# Altium footprint library Connectors.PcbLib: 228 footprints (part 14 of 15)
Each footprint in its own frame and in the unit in brackets; x right, y up, seen from the top. Pads: shape width x height; smd on the part's side, far side on the other; paste and mask are expansions set on the pad; w line width, h text height; cw(c..) or ccw(c..) is an arc to the next point about the centre after c.
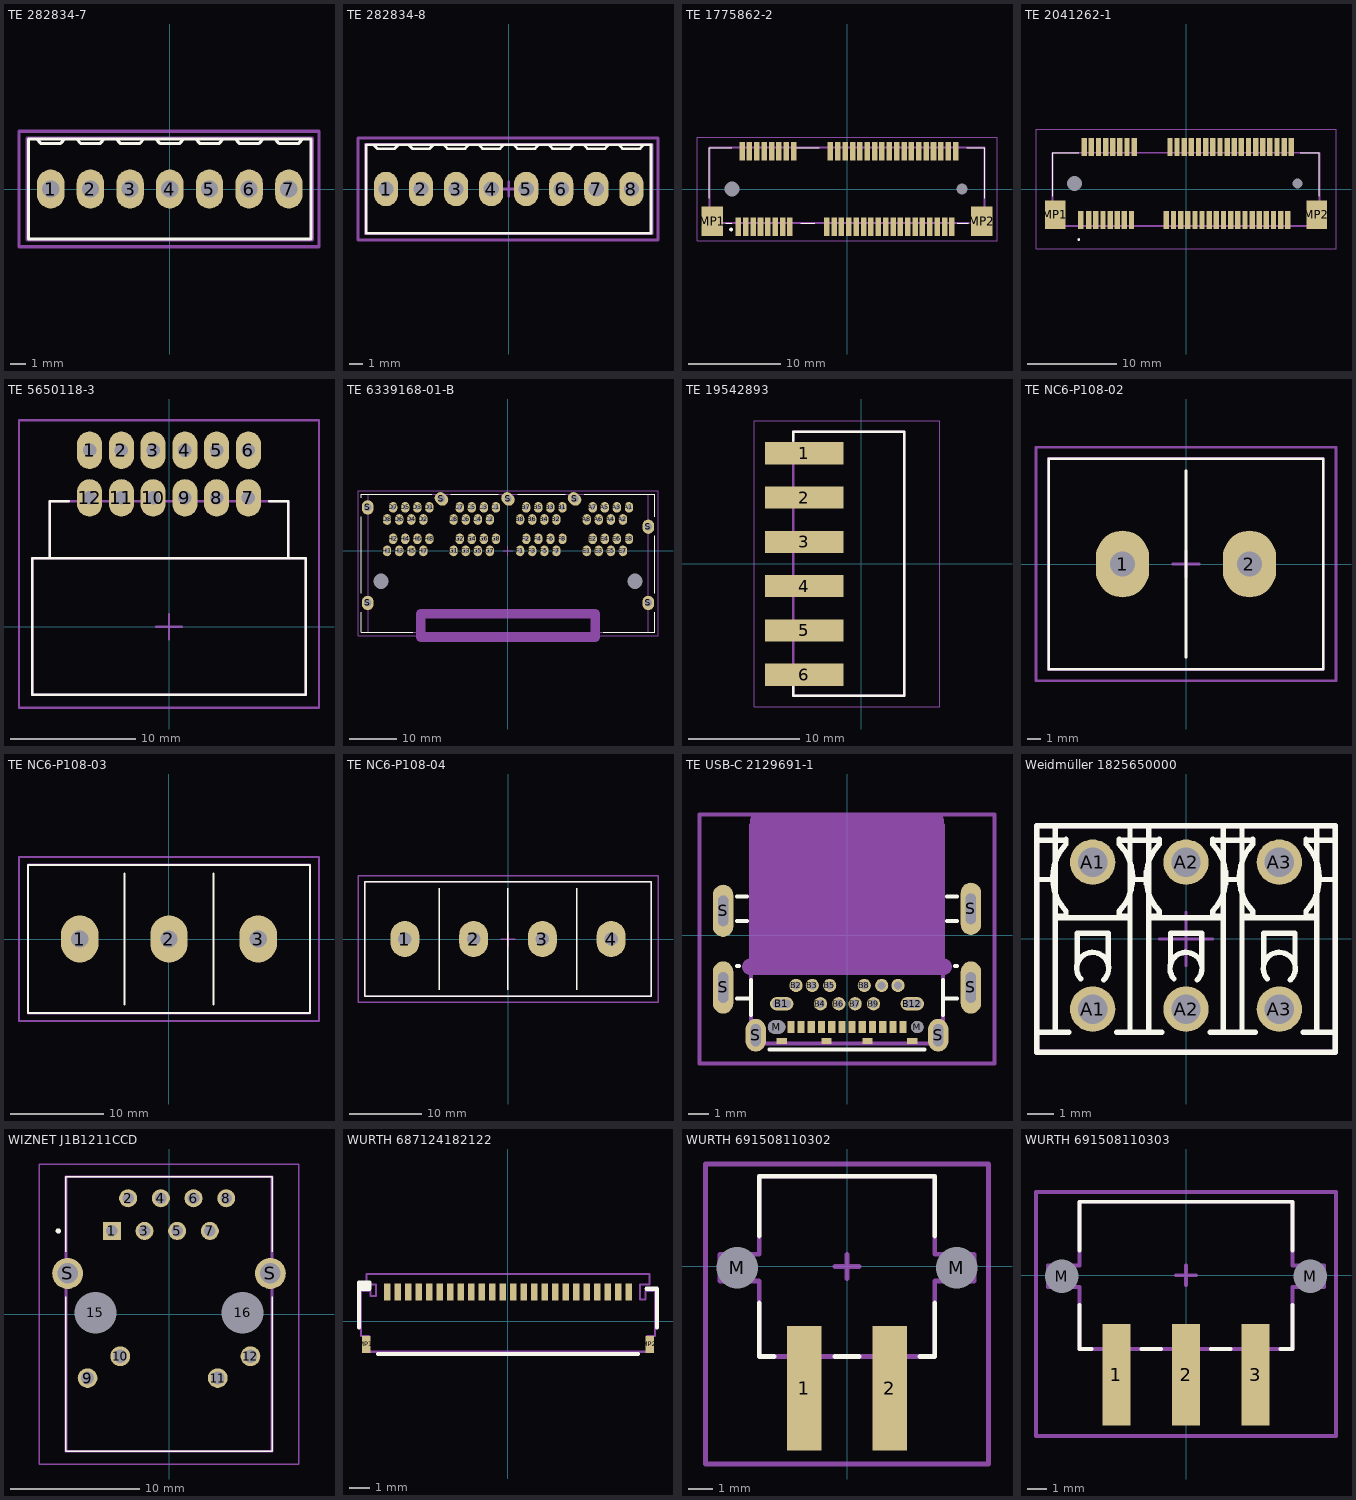
[diagram p13: the footprints below, top view; thin cyan lines are the x and y axes]

## TE 282834-7 [mm]
height 10
pads (7):
  oval 1.75x2.5 hole 1.1: 1(-7.62,0) 2(-5.08,0) 3(-2.54,0) 4(0,0) 5(2.54,0) 6(5.08,0) 7(7.62,0)
Top Overlay:
  lines w0.2: -8.509,3.2 -8.255,2.921 -6.985,2.921 -6.731,3.2 ; -5.969,3.2 -5.715,2.921 -4.445,2.921 -4.191,3.2 ; -3.429,3.2 -3.175,2.921 -1.905,2.921 -1.651,3.2 ; -0.889,3.2 -0.635,2.921 0.635,2.921 0.889,3.2 ; 1.651,3.2 1.905,2.921 3.175,2.921 3.429,3.2 ; 4.191,3.2 4.445,2.921 5.715,2.921 5.969,3.2 ; 6.731,3.2 6.985,2.921 8.255,2.921 8.509,3.2 ; -9.05,-3.2 -8.95,-3.2 9.05,-3.2 9.05,3.2 -9.05,3.2 -9.05,-3.2
Top Component Outline:
  lines w0.2: -9.12,-3.25 -9.12,3.25 9.12,3.25 9.12,-3.25 -9.12,-3.25
Top Courtyard:
  lines w0.2: -0.5,0 0.5,0 ; 0,-0.5 0,0.5 ; -9.65,-3.7 9.55,-3.7 9.55,-2.9 9.55,3.7 -9.65,3.7 -9.65,-3.3 -9.65,-3.7
3D body "TE Term Block 7port 282834-7-c-3d.STEP": height 10, standoff -3.4, extent -9.12,-3.25 9.12,3.25

## TE 282834-8 [mm]
height 10
pads (8):
  oval 1.75x2.5 hole 1.1: 1(-8.89,0) 2(-6.35,0) 3(-3.81,0) 4(-1.27,0) 5(1.27,0) 6(3.81,0) 7(6.35,0) 8(8.89,0)
Top Overlay:
  lines w0.2: -9.779,3.2 -9.525,2.921 -8.255,2.921 -8.001,3.2 ; -7.239,3.2 -6.985,2.921 -5.715,2.921 -5.461,3.2 ; -4.699,3.2 -4.445,2.921 -3.175,2.921 -2.921,3.2 ; -2.159,3.2 -1.905,2.921 -0.635,2.921 -0.381,3.2 ; 0.381,3.2 0.635,2.921 1.905,2.921 2.159,3.2 ; 2.921,3.2 3.175,2.921 4.445,2.921 4.699,3.2 ; 5.461,3.2 5.715,2.921 6.985,2.921 7.239,3.2 ; 8.001,3.2 8.255,2.921 9.525,2.921 9.779,3.2 ; -10.32,-3.2 -10.22,-3.2 10.32,-3.2 10.32,3.2 -10.32,3.2 -10.32,-3.2
Top Component Outline:
  lines w0.2: -10.39,-3.25 -10.39,3.25 10.39,3.25 10.39,-3.25 -10.39,-3.25
Top Courtyard:
  lines w0.2: -0.5,0 0.5,0 ; 0,-0.5 0,0.5 ; -10.92,-3.7 10.82,-3.7 10.82,-2.9 10.82,3.7 -10.92,3.7 -10.92,-3.3 -10.92,-3.7
3D body "TE Term Block 8port 282834-8-c-3d.STEP": height 10, standoff -3.4, extent -10.39,-3.25 10.39,3.25

## TE 1775862-2 [mm] "PCI-E MINI CARD CONNECTOR"
pads (56):
  rect 0.6x2 smd: 1(-11.8,-4.1) 2(-11.4,4.1) 3(-11,-4.1) 4(-10.6,4.1) 5(-10.2,-4.1) 6(-9.8,4.1) 7(-9.4,-4.1) 8(-9,4.1) 9(-8.6,-4.1) 10(-8.2,4.1) 11(-7.8,-4.1) 12(-7.4,4.1) 13(-7,-4.1) 14(-6.6,4.1) 15(-6.2,-4.1) 16(-5.8,4.1) 17(-2.2,-4.1) 18(-1.8,4.1) 19(-1.4,-4.1) 20(-1,4.1) 21(-0.6,-4.1) 22(-0.2,4.1) 23(0.2,-4.1) 24(0.6,4.1) 25(1,-4.1) 26(1.4,4.1) 27(1.8,-4.1) 28(2.2,4.1) 29(2.6,-4.1) 30(3,4.1) 31(3.4,-4.1) 32(3.8,4.1) 33(4.2,-4.1) 34(4.6,4.1) 35(5,-4.1) 36(5.4,4.1) 37(5.8,-4.1) 38(6.2,4.1) 39(6.6,-4.1) 40(7,4.1) 41(7.4,-4.1) 42(7.8,4.1) 43(8.2,-4.1) 44(8.6,4.1) 45(9,-4.1) 46(9.4,4.1) 47(9.8,-4.1) 48(10.2,4.1) 49(10.6,-4.1) 50(11,4.1) 51(11.4,-4.1) 52(11.8,4.1)
  round 0.825 hole 1.65: MH1(-12.5,0)
  round 0.575 hole 1.15: MH2(12.5,0)
  rect 2.3x3.2 smd: MP1(-14.65,-3.5) MP2(14.65,-3.5)
Top Overlay:
  lines w0.1: -14.95,-1 -14.95,4.5 -12.5,4.5 ; -13.2,-3.7 -12.5,-3.7 ; -5.5,4.5 -3,4.5 ; -5,-3.7 -3.5,-3.7 ; 12,-3.7 13.2,-3.7 ; 13,4.5 14.95,4.5 14.95,-1
  lines w0.2: -12.6,-4.5 cw(c-12.6,-4.4) -12.6,-4.3 cw(c-12.6,-4.4) -12.6,-4.5
Top Component Outline:
  lines w0.2: -14.95,-3.7 14.95,-3.7 14.95,4.5 -14.95,4.5 -14.95,-3.7
Top Courtyard:
  lines w0.1: -16.3,-5.6 16.3,-5.6 16.3,5.6 -16.3,5.6 -16.3,-5.6
3D body "TE 1775862-2.stp": height 5.19, standoff -0.66, extent -14.875,-4.5 15.025,4.58

## TE 2041262-1 [mm] "Mini PCI Express & mSATA Connector"
pads (56):
  rect 0.6x2 smd: 1(-11.8,-3.45) 2(-11.4,4.75) 3(-10.9,-3.45) 4(-10.6,4.75) 5(-10.1,-3.45) 6(-9.8,4.75) 7(-9.3,-3.45) 8(-9,4.75) 9(-8.5,-3.45) 10(-8.2,4.75) 11(-7.7,-3.45) 12(-7.4,4.75) 13(-6.9,-3.45) 14(-6.6,4.75) 15(-6.1,-3.45) 16(-5.8,4.75) 17(-2.2,-3.45) 18(-1.8,4.75) 19(-1.4,-3.45) 20(-1,4.75) 21(-0.6,-3.45) 22(-0.2,4.75) 23(0.2,-3.45) 24(0.6,4.75) 25(1,-3.45) 26(1.4,4.75) 27(1.8,-3.45) 28(2.2,4.75) 29(2.6,-3.45) 30(3,4.75) 31(3.4,-3.45) 32(3.8,4.75) 33(4.2,-3.45) 34(4.6,4.75) 35(5,-3.45) 36(5.4,4.75) 37(5.8,-3.45) 38(6.2,4.75) 39(6.6,-3.45) 40(7,4.75) 41(7.4,-3.45) 42(7.8,4.75) 43(8.2,-3.45) 44(8.6,4.75) 45(9,-3.45) 46(9.4,4.75) 47(9.8,-3.45) 48(10.2,4.75) 49(10.6,-3.45) 50(11,4.75) 51(11.4,-3.45) 52(11.8,4.75)
  round 0.825 hole 1.65: MH1(-12.5,0.65)
  round 0.575 hole 1.15: MH2(12.5,0.65)
  rect 2.3x3.2 smd: MP1(-14.65,-2.85) MP2(14.65,-2.85)
Top Overlay:
  lines w0.1: -14.95,-0.775 -14.95,4.1 -12,4.1 ; 12.8,4.125 14.95,4.1 14.95,-0.775
  lines w0.2: -12,-5.675 cw(c-12,-5.625) -12,-5.575 ; -12,-5.675 ccw(c-12,-5.625) -12,-5.575 ; -12,-5.675 cw(c-12,-5.625) -12,-5.575
Top Component Outline:
  lines w0.2: -14.95,-4.1 14.95,-4.1 14.95,4.1 -14.95,4.1 -14.95,-4.1
Top Courtyard:
  lines w0.1: -16.8,-6.675 16.8,-6.675 16.8,6.75 -16.8,6.75 -16.8,-6.675
3D body "2041262-1.stp": height 6.9, standoff -5, extent -15.57,-4.39 15.57,5.69

## TE 5650118-3 [mm]
height 9.35
pads (12):
  oval 2x3 hole 1.07: 1(-6.35,14.097) 2(-3.81,14.097) 3(-1.27,14.097) 4(1.27,14.097) 5(3.81,14.097) 6(6.35,14.097) 7(6.35,10.287) 8(3.81,10.287) 9(1.27,10.287) 10(-1.27,10.287) 11(-3.81,10.287) 12(-6.35,10.287)
Top Overlay:
  lines w0.2: -9.525,5.459 -9.525,10.027 -8,10.027 ; 8,10.027 9.525,10.027 9.525,5.459 ; -10.922,-5.461 -10.922,5.459 10.922,5.459 10.922,-5.461 -10.922,-5.461
Board:
  lines w0.2: -9.525,5.459 -9.525,10.027 9.525,10.027 9.525,5.459 ; -10.922,-5.461 10.922,-5.461 10.922,5.459 -10.922,5.459 -10.922,-5.461
Top Courtyard:
  lines w0.2: -1,0 1,0 ; 0,-1 0,1 ; -12,-6.5 12,-6.5 12,16.5 -12,16.5 -12,-6.5
3D body "TE c-5650118-3-a-3d.STEP": height 9.35, standoff -2.29, extent -10.922,-5.461 10.922,14.465

## TE 6339168-01-B [mm]
height 26.16
pads (73):
  oval 1.75x2.25 hole 1.02: A1(25.4,9.14) A2(24.13,6.6) A3(22.86,9.14) A4(21.59,6.6) A5(20.32,9.14) A6(19.05,6.6) A7(17.78,9.14) A8(16.51,6.6) B1(11.43,9.14) B2(10.16,6.6) B3(8.89,9.14) B4(7.62,6.6) B5(6.35,9.14) B6(5.08,6.6) B7(3.81,9.14) B8(2.54,6.6) C1(-2.54,9.14) C2(-3.81,6.6) C3(-5.08,9.14) C4(-6.35,6.6) C5(-7.62,9.14) C6(-8.89,6.6) C7(-10.16,9.14) C8(-11.43,6.6) D1(-16.51,9.14) D2(-17.78,6.6) D3(-19.05,9.14) D4(-20.32,6.6) D5(-21.59,9.14) D6(-22.86,6.6) D7(-24.13,9.14) D8(-25.4,6.6) E1(16.51,0) E2(17.78,2.54) E3(19.05,0) E4(20.32,2.54) E5(21.59,0) E6(22.86,2.54) E7(24.13,0) E8(25.4,2.54) F1(2.54,0) F2(3.81,2.54) F3(5.08,0) F4(6.35,2.54) F5(7.62,0) F6(8.89,2.54) F7(10.16,0) F8(11.43,2.54) G1(-11.43,0) G2(-10.16,2.54) G3(-8.89,0) G4(-7.62,2.54) G5(-6.35,0) G6(-5.08,2.54) G7(-3.81,0) G8(-2.54,2.54) H1(-25.4,0) H2(-24.13,2.54) H3(-22.86,0) H4(-21.59,2.54) H5(-20.32,0) H6(-19.05,2.54) H7(-17.78,0) H8(-16.51,2.54)
  round 0 hole 3.25 unplated: M(-26.67,-6.35) M(26.67,-6.35)
  oval 2.5x3 hole 1.57: S(-29.46,-10.92) S(-29.46,9.14) S(29.46,-10.92) S(29.46,5.08)
  oval 2.5x3 hole 1.57 rot 45: S(-13.97,10.92) S(0,10.92) S(13.97,10.92)
Top Overlay:
  lines w0.2: -30.8,-12.85 -30.8,-17.05 -20,-17.05 ; -30.8,-8.85 -30.8,7.15 ; -30.8,11.15 -30.8,11.95 -16,11.95 ; -12,11.95 -2,11.95 ; 2,11.95 12,11.95 ; 16,11.95 30.8,11.95 30.8,7.15 ; 20,-17.05 30.8,-17.05 30.8,-12.85 ; 30.8,-8.85 30.8,3.15
Top Component Outline:
  lines w0.2: -29.4,-17.075 29.5,-17.075 29.5,11.915 -29.4,11.915 -29.4,-17.075
Top Courtyard:
  lines w0.2: -1,0 1,0 ; 0,-1 0,1 ; -31.5,-17.85 31.5,-17.85 31.5,12.65 -31.5,12.65 -31.5,-17.85
Milling:
  lines w2: -18.3,-18.15 -18.3,-13.15 0,-13.15 18.3,-13.15 18.3,-18.15 -18.3,-18.15
3D body "TE 6339168-01.STEP": height 26.66, standoff -4.06, extent -30.821,-17.075 30.821,11.915

## TE 19542893 [mm]
pads (6):
  rect 7.1x2 smd: 1(-5.125,9.975) 2(-5.125,5.975) 3(-5.125,1.975) 4(-5.125,-2.025) 5(-5.125,-6.025) 6(-5.125,-10.025)
Top Overlay:
  lines w0.2: -6.125,-11.1 -6.125,-11.925 3.9,-11.925 3.9,11.925 -6.125,11.925 -6.125,11.1
Top Component Outline:
  lines w0.2: -6.125,-11.925 -6.125,11.925 3.9,11.925 3.9,-11.925 -6.125,-11.925
Top Courtyard:
  lines w0.1: -9.675,-12.925 -9.675,12.925 7.125,12.925 7.125,-12.925 -9.675,-12.925
3D body "1954289-3.stp": height 4.18, standoff 0, extent -8.46,-11.95 3.788,11.95

## TE NC6-P108-02 [mm]
height 16.51
pads (2):
  oval 4x5 hole 1.854: 1(-4.763,0) 2(4.763,0)
Top Overlay:
  lines w0.2: 0,-7 0,7 ; -10.3,-7.9 -10.3,7.9 10.3,7.9 10.3,-7.9 -10.3,-7.9
Board:
  lines w0.2: -10.312,-7.937 -10.312,7.938 10.287,7.938 10.287,-7.937 -10.312,-7.937
Top Courtyard:
  lines w0.2: -1,0 1,0 ; 0,-1 0,1 ; -11.25,-8.75 -11.25,8.75 11.25,8.75 11.25,-8.75 -11.25,-8.75
3D body "TE NC6-P108-02.STEP": height 16.38, standoff -4.57, extent -10.312,-7.937 10.287,7.938

## TE NC6-P108-03 [mm]
height 16.51
pads (3):
  oval 4x5 hole 1.854: 1(-9.525,0) 2(0,0) 3(9.526,0)
Top Overlay:
  lines w0.2: -4.763,-7 -4.763,7 ; 4.763,-7 4.763,7 ; -15.062,-7.9 15.063,-7.9 15.063,7.9 -15.062,7.9 -15.062,-7.9
Board:
  lines w0.2: -15.075,-7.937 15.05,-7.937 15.05,7.938 -15.075,7.938 -15.075,-7.937
Top Courtyard:
  lines w0.2: -1,0 1,0 ; 0,-1 0,1 ; -16.013,-8.75 16.013,-8.75 16.013,8.75 -16.013,8.75 -16.013,-8.75
3D body "TE NC6-P108-03.STEP": height 16.38, standoff -4.57, extent -15.075,-7.937 15.05,7.938

## TE NC6-P108-04 [mm]
height 16.51
pads (4):
  oval 4x5 hole 1.854: 1(-14.289,0) 2(-4.764,0) 3(4.761,0) 4(14.286,0)
Top Overlay:
  lines w0.2: -9.526,-7 -9.526,7 ; -0.001,-7 -0.001,7 ; 9.524,-7 9.524,7 ; -19.826,-7.9 19.826,-7.9 19.826,7.9 -19.826,7.9 -19.826,-7.9
Board:
  lines w0.2: -19.838,-7.937 19.813,-7.937 19.813,7.938 -19.838,7.938 -19.838,-7.937
Top Courtyard:
  lines w0.2: -1,0 1,0 ; 0,-1 0,1 ; -20.776,-8.75 20.776,-8.75 20.776,8.75 -20.776,8.75 -20.776,-8.75
3D body "TE NC6-P108-04.STEP": height 16.38, standoff -4.57, extent -19.837,-7.937 19.812,7.938

## TE USB-C 2129691-1 [mm]
height 2.27
pads (36):
  rect 0.35x0.6 smd: A1(2.75,-4.5) A2(2.25,-4.5) A3(1.75,-4.5) A4(1.25,-4.5) A5(0.75,-4.5) A6(0.25,-4.5) A7(-0.25,-4.5) A8(-0.75,-4.5) A9(-1.25,-4.5) A10(-1.75,-4.5) A11(-2.25,-4.5) A12(-2.75,-4.5)
  oval 1.15x0.65 hole 0.4 slot 0.9 at 0 deg: B1(-3.2,-3.36) B12(3.2,-3.36)
  round 0.65 hole 0.4: B2(-2.5,-2.46) B3(-1.7,-2.46) B4(-1.3,-3.36) B5(-0.85,-2.46) B6(-0.4,-3.36) B7(0.4,-3.36) B8(0.85,-2.46) B9(1.3,-3.36) B10(1.7,-2.46) B11(2.5,-2.46)
  oval 0.85x0.65 hole 0.65 slot 0.85 at 0 deg unplated mask+0.102: M(-3.45,-4.5)
  round 0.6 hole 0.6 unplated mask+0.102: M(3.45,-4.5)
  oval 1x2.56 hole 0.5 slot 1.5 at 90 deg: S(-6.075,-2.56) S(-6.075,1.2) S(6.075,-2.56) S(6.075,1.3)
  oval 1x1.6 hole 0.5 slot 1.1 at 90 deg: S(-4.475,-4.9) S(4.475,-4.9)
  rect 0.5x0.3 smd: S(-3.2,-5.19) S(-1,-5.19) S(1,-5.19) S(3.2,-5.19)
Top Overlay:
  lines w0.2: -5.4,-3.1 -4.7,-3.1 ; -5.4,-1.5 -5.3,-1.5 ; -5.4,0.7 -4.9,0.7 ; -5.4,1.9 -4.9,1.9 ; -4.7,-3.9 -4.7,-2.2 ; -3.8,-5.6 0,-5.6 3.8,-5.6 ; 4.7,-3.9 4.7,-2.2 ; 4.7,-3.1 5.4,-3.1 ; 4.9,0.7 5.4,0.7 ; 4.9,1.9 5.4,1.9 ; 5.3,-1.5 5.4,-1.5
Board:
  lines w0.2: -4.7,-5.3 0,-5.3 4.7,-5.3 4.7,5.4 0,5.4 -4.7,5.4 -4.7,-5.3
Top Courtyard:
  lines w0.2: -0.635,0 0.635,0 ; 0,-0.635 0,0.635 ; -7.239,-6.278 0,-6.278 7.239,-6.278 7.239,5.914 0,5.914 -7.239,5.914 -7.239,-6.278
Milling:
  region: 4.35,5.61 -4.35,5.61 -4.35,-1.54 4.35,-1.54
  lines w0.8: -4.75,-1.54 4.75,-1.54 ; -4.35,-1.54 -4.35,5.61 0,5.61 4.35,5.61 4.35,-1.54
3D body "TE USB 2129691-1.STEP": height 2.27, standoff -1.07, extent -6.175,-5.3 6.175,5.4

## Weidmüller 1825650000 [mm] "LSF  LSF-SMT 3.50/03/180 3.5"
height 14
pads (6):
  round 1.7 hole 1.1: A1(-3.5,-2.63) A1(-3.5,2.88) A2(0,-2.63) A2(0,2.88) A3(3.5,-2.63) A3(3.5,2.88)
Top Overlay:
  lines w0.2: -5.6,-3.5 -4.4,-3.5 ; -5.6,2.231 -4.999,2.231 ; -5.6,3.7 -4.9,3.7 -4.5,3.7 ; -4.9,-3.5 -4.9,4.25 ; -4.9,0.85 -4.5,0.85 -4.5,1.05 cw(c-3.188,2.3) -4.5,3.55 -4.5,3.75 ; -4.84,0.8 -2.16,0.8 ; -4.699,3.3 -4.682,3.326 -4.646,3.377 -4.608,3.426 -4.588,3.45 ; -4.081,-0.951 -4.081,0.22 -2.911,0.22 -2.911,-0.984 ; -3.952,-1.495 cw(c-3.5,-1.1) -3.089,-1.537 ; -2.6,-3.5 -0.9,-3.5 ; -2.5,3.7 -2.1,3.7 -1.4,3.7 -1,3.7 ; -2.5,3.75 -2.5,3.55 cw(c-3.813,2.3) -2.5,1.05 -2.5,0.85 -2.1,0.85 ; -2.412,3.45 -2.392,3.426 -2.354,3.377 -2.318,3.326 -2.301,3.3 ; -2.1,-3.5 -2.1,4.25 ; -2.001,2.231 -1.499,2.231 ; -1.4,-3.5 -1.4,4.25 ; -1.4,0.85 -1,0.85 -1,1.05 cw(c0.312,2.3) -1,3.55 -1,3.75 ; -1.34,0.8 1.34,0.8 ; -0.581,-0.951 -0.581,0.22 0.589,0.22 0.589,-0.984 ; -0.452,-1.495 cw(c0,-1.1) 0.411,-1.537 ; 0.9,-3.5 2.6,-3.5 ; 1,3.7 1.4,3.7 2.1,3.7 2.5,3.7 ; 1,3.75 1,3.55 cw(c-0.313,2.3) 1,1.05 1,0.85 1.4,0.85 ; 1.4,-3.5 1.4,4.25 ; 1.499,2.231 2.001,2.231 ; 2.1,-3.5 2.1,4.25 ; 2.1,0.85 2.5,0.85 2.5,1.05 cw(c3.812,2.3) 2.5,3.55 2.5,3.75 ; 2.16,0.8 4.84,0.8 ; 2.919,-0.951 2.919,0.22 4.089,0.22 4.089,-0.984 ; 3.048,-1.495 cw(c3.5,-1.1) 3.911,-1.537 ; 4.4,-3.5 5.6,-3.5 ; 4.5,3.7 4.9,3.7 5.6,3.7 ; 4.5,3.75 4.5,3.55 cw(c3.187,2.3) 4.5,1.05 4.5,0.85 4.9,0.85 ; 4.9,-3.5 4.9,4.25 ; 4.999,2.231 5.6,2.231 ; -5.6,-4.25 5.6,-4.25 5.6,4.25 -5.6,4.25 -5.6,-4.25
Top Courtyard:
  lines w0.1: -1,0 1,0 ; 0,-1 0,1
  lines w0.2: -5.6,-4.25 5.6,-4.25 5.6,4.25 -5.6,4.25 -5.6,-4.25
3D body "LSF-SMT3.5_3_180_3.5_SW_1825650000.stp": height 13.61, standoff -3.49, extent -5.6,-4.25 5.6,4.25

## WIZNET J1B1211CCD [mm] "SINGLE RJ45 CONNECTOR CONNECTOR CONNECTOR CONNECTOR MODULE WITH 10/100 BASE-TX BASE-TX BASE-TX BASE-TX  MAGNETICS MAGNETICS MAGNETICS MAGNETICS AND LEDS"
height 13.55
pads (16):
  rect 1.4x1.4 hole 0.9: 1(-4.445,6.45)
  round 1.4 hole 0.9: 2(-3.175,8.99) 3(-1.905,6.45) 4(-0.635,8.99) 5(0.635,6.45) 6(1.905,8.99) 7(3.175,6.45) 8(4.445,8.99)
  round 1.53 hole 1.02: 9(-6.325,-4.98) 10(-3.785,-3.28) 11(3.785,-4.98) 12(6.325,-3.28)
  round 1.625 hole 3.25: 15(-5.715,0.1) 16(5.715,0.1)
  round 2.4 hole 1.6: S(-7.875,3.15) S(7.875,3.15)
Top Overlay:
  lines w0.1: -8,1.35 -8,-10.65 8,-10.65 8,1.35 ; -8,4.85 -8,10.65 8,10.65 8,4.85
  lines w0.2: -8.6,6.35 ccw(c-8.6,6.45) -8.6,6.55 ccw(c-8.6,6.45) -8.6,6.35
Top Component Outline:
  lines w0.2: -8,-10.65 8,-10.65 8,10.65 -8,10.65 -8,-10.65
Top Courtyard:
  lines w0.1: -10.075,-11.65 10.075,-11.65 10.075,11.65 -10.075,11.65 -10.075,-11.65
3D body "User Library-J1B1211CCD.step": height 14.36, standoff -3.95, extent -9.009,-10.65 9.009,10.65

## WURTH 687124182122 [mm]
pads (26):
  rect 0.3x0.8 smd paste+0 mask+0.102: 1(-5.75,1.4) 2(-5.25,1.4) 3(-4.75,1.4) 4(-4.25,1.4) 5(-3.75,1.4) 6(-3.25,1.4) 7(-2.75,1.4) 8(-2.25,1.4) 9(-1.75,1.4) 10(-1.25,1.4) 11(-0.75,1.4) 12(-0.25,1.4) 13(0.25,1.4) 14(0.75,1.4) 15(1.25,1.4) 16(1.75,1.4) 17(2.25,1.4) 18(2.75,1.4) 19(3.25,1.4) 20(3.75,1.4) 21(4.25,1.4) 22(4.75,1.4) 23(5.25,1.4) 24(5.75,1.4)
  rect 0.4x0.8 smd paste+0 mask+0.102: MP1(-6.75,-1.1) MP2(6.75,-1.1)
Top Overlay:
  lines w0.2: -7.1,-0.3 -7.1,1.55 ; -7.1,1.7 -6.6,1.7 ; -6.2,-1.55 6.2,-1.55 ; 6.6,1.55 7.1,1.55 7.1,-0.3 ; -7.1,1.55 -7.1,1.85 -6.6,1.85 -6.6,1.55 -7.1,1.55
Top Component Outline:
  lines w0.1: -7,-0.7 -6.62,-0.7 -6.62,-1.45 6.62,-1.45 6.62,-0.7 7,-0.7 7,1.45 6.55,1.45 6.55,1.05 6.3,1.05 6.3,1.75 6.75,1.75 6.75,2.25 -6.75,2.25 -6.75,1.75 -6.3,1.75 -6.3,1.2 -6.55,1.2 -6.55,1.45 -7,1.45 -7,-0.7
3D body "Wurth 687124182122.stp": height 0.96, standoff -0.03, extent -7,-1.45 7,2.25

## WURTH 691508110302 [mm]
height 11.2
pads (4):
  rect 1.4x5.1 smd: 1(-1.75,-5) 2(1.75,-5)
  round 1 hole 1.7 unplated: M(-4.5,-0.05) M(4.5,-0.05)
Top Overlay:
  lines w0.2: -3.6,-1.5 -3.6,-3.7 -3,-3.7 ; -3.6,1.25 -3.6,3.7 3.6,3.7 3.6,1.25 ; -0.5,-3.7 0.5,-3.7 ; 3,-3.7 3.6,-3.7 3.6,-1.5
Board:
  lines w0.2: -5.2,-0.6 -3.6,-0.6 -3.6,-3.7 0,-3.7 3.6,-3.7 3.6,-0.6 5.2,-0.6 5.2,0.5 3.6,0.5 3.6,3.7 -3.6,3.7 -3.6,0.5 -5.2,0.5 -5.2,-0.6
Top Courtyard:
  lines w0.2: -0.5,0 0.5,0 ; 0,-0.5 0,0.5 ; -5.8,-8.1 -5.8,4.2 5.8,4.2 5.8,-8.1 -5.8,-8.1
3D body "Wurth 691508110302.STEP": height 11.2, standoff -2, extent -5.175,-7.2 5.175,3.7

## WURTH 691508110303 [mm]
height 11.2
pads (5):
  rect 1.4x5.1 smd: 1(-3.5,-5) 2(0,-5) 3(3.5,-5)
  round 1 hole 1.7 unplated: M(-6.25,-0.05) M(6.25,-0.05)
Top Overlay:
  lines w0.2: -5.35,-1.5 -5.35,-3.7 -4.75,-3.7 ; -5.35,1.25 -5.35,3.7 5.35,3.7 5.35,1.25 ; -2.25,-3.7 -1.25,-3.7 ; 1.25,-3.7 2.25,-3.7 ; 4.75,-3.7 5.35,-3.7 5.35,-1.5
Board:
  lines w0.2: -6.95,-0.6 -5.35,-0.6 -5.35,-3.7 5.35,-3.7 5.35,-0.6 6.95,-0.6 6.95,0.5 5.35,0.5 5.35,3.7 -5.35,3.7 -5.35,0.5 -6.95,0.5 -6.95,-0.6
Top Courtyard:
  lines w0.2: -0.5,0 0.5,0 ; 0,-0.5 0,0.5 ; -7.55,-8.1 -7.55,4.2 7.55,4.2 7.55,-8.1 -7.55,-8.1
3D body "Wurth 691508110303.STEP": height 11.2, standoff -2, extent -6.925,-7.2 6.925,3.7